# Altium footprint library CHIP-Library.PcbLib: 345 footprints (part 20 of 22)
Each footprint in its own frame and in the unit in brackets; x right, y up, seen from the top. Pads: shape width x height; smd on the part's side, far side on the other; paste and mask are expansions set on the pad; w line width, h text height; cw(c..) or ccw(c..) is an arc to the next point about the centre after c.
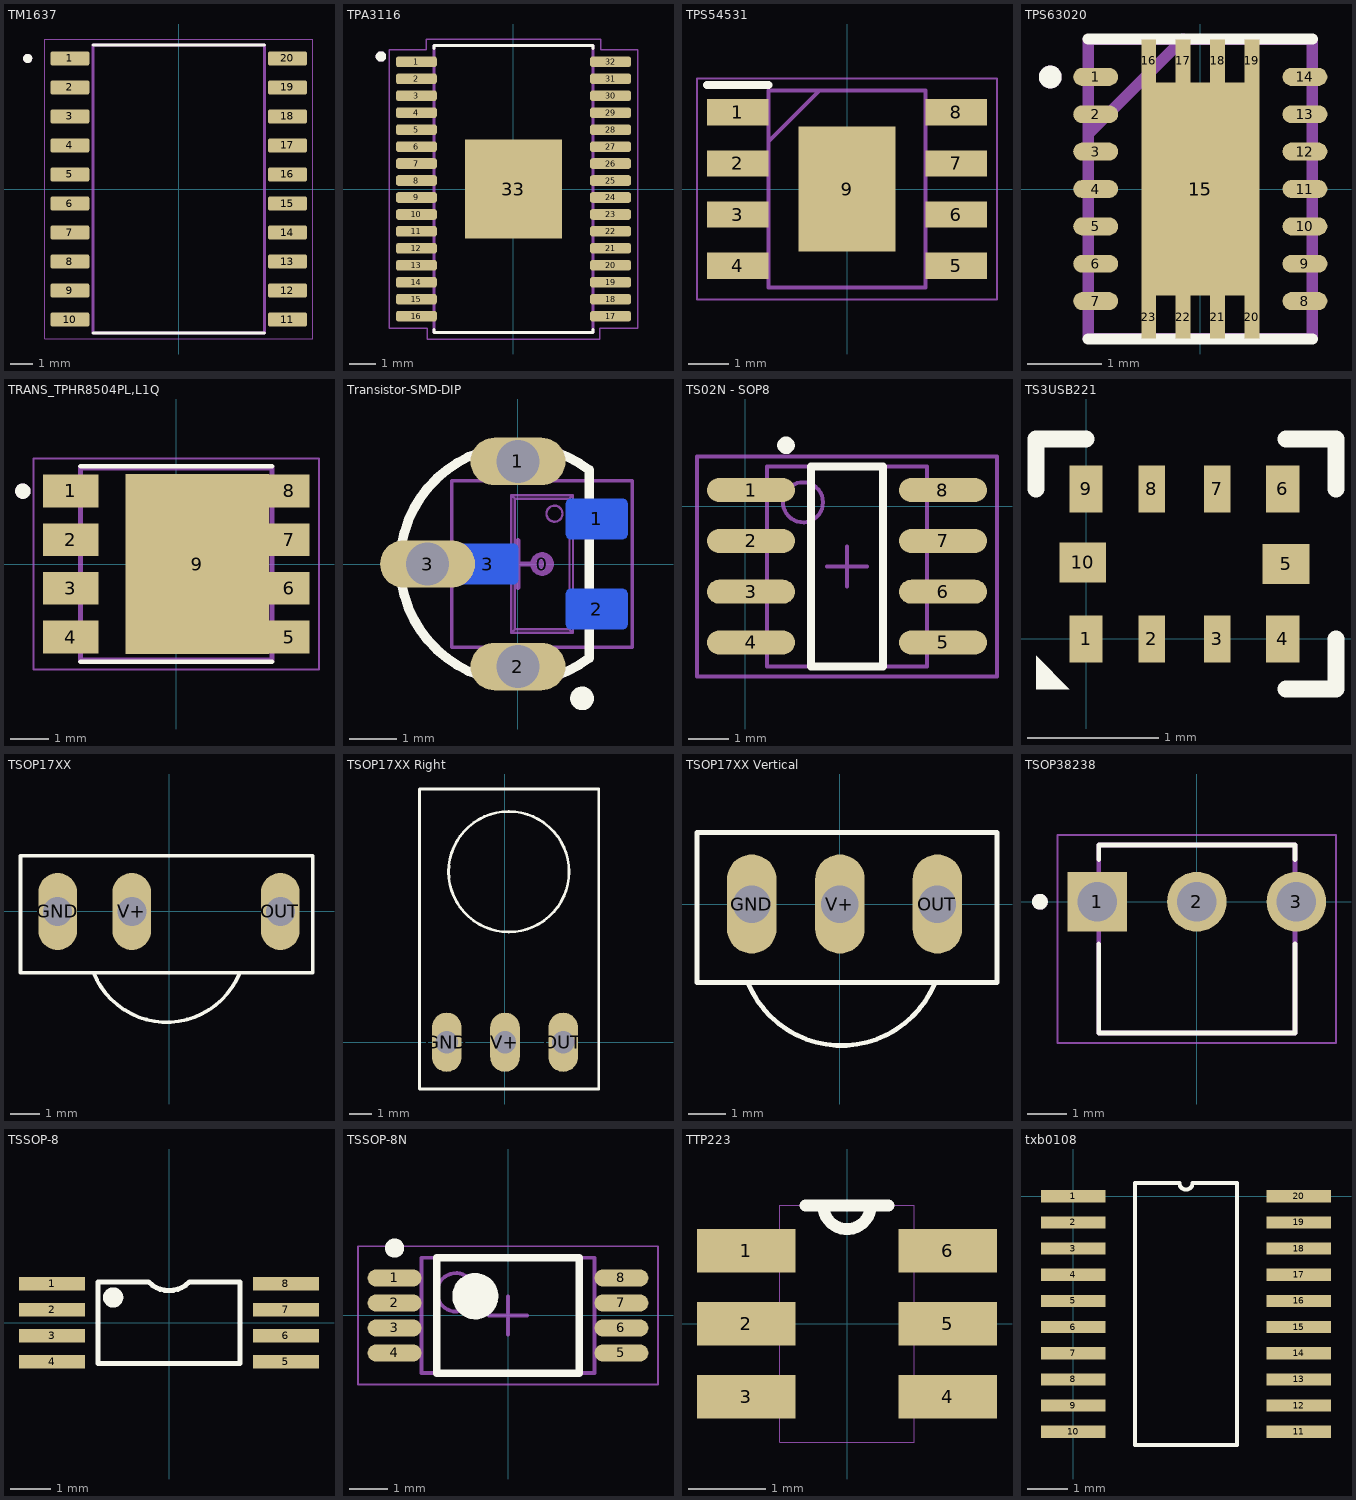
[diagram p19: the footprints below, top view; thin cyan lines are the x and y axes]

## TM1637 [mm] "SOP20"
height 2.55
pads (20):
  rrect25% 1.7x0.61 smd: 1(-4.76,5.715) 2(-4.76,4.445) 3(-4.76,3.175) 4(-4.76,1.905) 5(-4.76,0.635) 6(-4.76,-0.635) 7(-4.76,-1.905) 8(-4.76,-3.175) 9(-4.76,-4.445) 10(-4.76,-5.715) 11(4.76,-5.715) 12(4.76,-4.445) 13(4.76,-3.175) 14(4.76,-1.905) 15(4.76,-0.635) 16(4.76,0.635) 17(4.76,1.905) 18(4.76,3.175) 19(4.76,4.445) 20(4.76,5.715)
Top Overlay:
  circle w0.2: c-6.61,5.715 r0.1
  lines w0.127: -3.75,-6.3 3.75,-6.3 ; -3.75,6.3 3.75,6.3
Mechanical 13:
  circle w0.2: c-6.61,5.715 r0.1
  lines w0.127: -3.75,-6.3 3.75,-6.3 3.75,6.3 -3.75,6.3 -3.75,-6.3
Mechanical 15:
  lines w0.05: -5.86,-6.55 -5.86,6.55 5.86,6.55 5.86,-6.55 -5.86,-6.55
3D body "step_temp.STEP": height 2.55, standoff 0, extent -5.175,-6.3 5.175,6.3

## TPA3116 [mm]
pads (33):
  rrect50% 1.57x0.41 smd: 1(-3.72,4.875) 2(-3.72,4.225) 3(-3.72,3.575) 4(-3.72,2.925) 5(-3.72,2.275) 6(-3.72,1.625) 7(-3.72,0.975) 8(-3.72,0.325) 9(-3.72,-0.325) 10(-3.72,-0.975) 11(-3.72,-1.625) 12(-3.72,-2.275) 13(-3.72,-2.925) 14(-3.72,-3.575) 15(-3.72,-4.225) 16(-3.72,-4.875) 17(3.72,-4.875) 18(3.72,-4.225) 19(3.72,-3.575) 20(3.72,-2.925) 21(3.72,-2.275) 22(3.72,-1.625) 23(3.72,-0.975) 24(3.72,-0.325) 25(3.72,0.325) 26(3.72,0.975) 27(3.72,1.625) 28(3.72,2.275) 29(3.72,2.925) 30(3.72,3.575) 31(3.72,4.225) 32(3.72,4.875)
  rect 3.71x3.81 smd paste-3: 33(0,0)
Top Overlay:
  circle w0.2: c-5.08,5.08 r0.1
  lines w0.127: -3.05,-5.4 -3.05,-5.5 3.05,-5.5 3.05,-5.4 ; -3.05,5.4 -3.05,5.5 3.05,5.5 3.05,5.4
Top Paste:
  region: 1.485,-1.535 0.185,-1.535 0.185,-0.185 1.485,-0.185
  region: -0.185,-1.535 -1.485,-1.535 -1.485,-0.185 -0.185,-0.185
  region: -0.185,0.185 -1.485,0.185 -1.485,1.535 -0.185,1.535
  region: 1.485,0.185 0.185,0.185 0.185,1.535 1.485,1.535
Mechanical 13:
  circle w0.2: c-5.08,5.08 r0.1
  lines w0: -3.099,-5.029 -3.099,-4.724 ; -3.099,-4.369 -3.099,-4.064 ; -3.099,-3.734 -3.099,-3.429 ; -3.099,-3.073 -3.099,-2.769 ; -3.099,-2.413 -3.099,-2.134 ; -3.099,-1.778 -3.099,-1.473 ; -3.099,-1.118 -3.099,-0.813 ; -3.099,-0.483 -3.099,-0.178 ; -3.099,0.178 -3.099,0.483 ; -3.099,0.813 -3.099,1.118 ; -3.099,1.473 -3.099,1.778 ; -3.099,2.134 -3.099,2.413 ; -3.099,2.769 -3.099,3.073 ; -3.099,3.429 -3.099,3.734 ; -3.099,4.064 -3.099,4.369 ; -3.099,4.724 -3.099,5.029 ; 3.099,-5.029 3.099,-4.724 ; 3.099,-4.369 3.099,-4.064 ; 3.099,-3.734 3.099,-3.429 ; 3.099,-3.073 3.099,-2.769 ; 3.099,-2.413 3.099,-2.134 ; 3.099,-1.778 3.099,-1.473 ; 3.099,-1.118 3.099,-0.813 ; 3.099,-0.483 3.099,-0.178 ; 3.099,0.178 3.099,0.483 ; 3.099,0.813 3.099,1.118 ; 3.099,1.473 3.099,1.778 ; 3.099,2.134 3.099,2.413 ; 3.099,2.769 3.099,3.073 ; 3.099,3.429 3.099,3.734 ; 3.099,4.064 3.099,4.369 ; 3.099,4.724 3.099,5.029
  lines w0.127: -3.05,-5.5 -3.05,5.5 3.05,5.5 3.05,-5.5 -3.05,-5.5
Mechanical 15:
  lines w0.05: -4.76,-5.33 -4.76,5.33 -3.35,5.33 -3.35,5.75 3.35,5.75 3.35,5.33 4.76,5.33 4.76,-5.33 3.3,-5.33 3.3,-5.75 -3.3,-5.75 -3.3,-5.33 -4.76,-5.33
3D body "TPA3116D2QDADRQ1.STEP": height 1.2, standoff 0, extent -4.05,-5.5 4.05,5.5

## TPS54531 [mm]
pads (9):
  rect 1.525x0.65 smd: 1(-2.712,1.905) 2(-2.712,0.635) 3(-2.712,-0.635) 4(-2.712,-1.905) 5(2.712,-1.905) 6(2.712,-0.635) 7(2.712,0.635) 8(2.712,1.905)
  rect 2.4x3.1 smd: 9(0,0)
Top Overlay:
  lines w0.2: -3.475,2.58 -1.95,2.58
Mechanical 15:
  lines w0.1: -1.95,1.18 -0.68,2.45 ; -1.95,-2.45 1.95,-2.45 1.95,2.45 -1.95,2.45 -1.95,-2.45
Mechanical 20:
  lines w0.05: -3.725,-2.75 3.725,-2.75 3.725,2.75 -3.725,2.75 -3.725,-2.75
3D body "TPS54531DDAR.stp": height 1.57, standoff 0, extent -3,-2.45 3,2.45

## TPS63020 [mm]
pads (23):
  oval 0.6x0.24 smd: 1(-1.4,1.5) 2(-1.4,1) 3(-1.4,0.5) 4(-1.4,0) 5(-1.4,-0.5) 6(-1.4,-1) 7(-1.4,-1.5) 8(1.4,-1.5) 9(1.4,-1) 10(1.4,-0.5) 11(1.4,0) 12(1.4,0.5) 13(1.4,1) 14(1.4,1.5)
  rect 1.58x2.85 smd: 15(0,0)
  rect 0.2x0.575 smd: 16(-0.69,1.713) 17(-0.23,1.713) 18(0.23,1.713) 19(0.69,1.713) 20(0.69,-1.713) 21(0.23,-1.713) 22(-0.23,-1.713) 23(-0.69,-1.713)
Top Overlay:
  lines w0.152: -1.499,-2.007 1.499,-2.007 ; -1.499,2.007 1.499,2.007 ; -2.083,1.499 ccw(c-2.007,1.499) -1.93,1.499 ccw(c-2.007,1.499) -2.083,1.499
Top Paste:
  region: 0.12,-0.12 0.78,-0.12 0.78,-1.372 0.12,-1.372
  region: 0.12,1.37 0.78,1.37 0.78,0.12 0.12,0.12
  region: -0.781,1.37 -0.12,1.37 -0.12,0.12 -0.781,0.12
  region: -0.78,-0.12 -0.12,-0.12 -0.12,-1.37 -0.78,-1.37
Mechanical 4:
  lines w0.152: -2.083,1.499 ccw(c-2.007,1.499) -1.93,1.499 ; -2.083,1.499 cw(c-2.007,1.499) -1.93,1.499 ; -2.083,1.499 ccw(c-2.007,1.499) -1.93,1.499 ; -2.083,1.499 cw(c-2.007,1.499) -1.93,1.499 ; -1.5,-2 1.5,-2 ; -1.5,-2 -1.5,2 ; -1.5,-2 1.5,-2 ; -1.5,-2 -1.5,2 ; -1.5,2 1.5,2 ; -1.5,2 1.5,2 ; 1.5,-2 1.5,2 ; 1.5,-2 1.5,2 ; -1.499,0.737 -0.229,2.007 -1.499,0.737
3D body "User Library-VSON-14-1.step": height 1.06, standoff 0.01, extent -1.588,-2.084 1.622,2.126

## TRANS_TPHR8504PL,L1Q [mm]
pads (9):
  rect 1.45x0.85 smd: 1(-2.75,1.905) 2(-2.75,0.635) 3(-2.75,-0.635) 4(-2.75,-1.905)
  rect 1.05x0.85 smd: 5(2.95,-1.905) 6(2.95,-0.635) 7(2.95,0.635) 8(2.95,1.905)
  rect 3.75x4.7 smd paste-3: 9(0.55,0)
Top Overlay:
  circle w0.2: c-4,1.9 r0.1
  lines w0.127: -2.5,-2.55 2.5,-2.55 ; -2.5,2.55 2.5,2.55
Top Paste:
  region: 2.04,-1.186 -0.94,-1.186 -0.94,1.186 2.04,1.186
Mechanical 13:
  circle w0.2: c-4,1.9 r0.1
  lines w0.127: -2.5,-2.5 2.5,-2.5 2.5,2.5 -2.5,2.5 -2.5,-2.5
Mechanical 15:
  lines w0.05: -3.725,-2.75 3.725,-2.75 3.725,2.75 -3.725,2.75 -3.725,-2.75
3D body "TPHR8504PL,L1Q.STEP": height 1.01, standoff 0.01, extent -2.921,-2.633 3.079,2.667

## Transistor-SMD-DIP [mm]
pads (7):
  round 0.5 on Mech15: 0(0.508,0)
  oval 2x1 hole 0.9: 1(0,2.159) 2(0,-2.159) 3(-1.905,0)
  rrect25% 1.3x0.85 smd far side: 1(1.658,0.95) 2(1.658,-0.95) 3(-0.642,0)
Top Overlay:
  circle w0.25: c1.35,-2.83 r0.125
  lines w0.2: 1.5,-1.98 cw(c0,0) 1.5,1.98 1.5,-1.98
Bottom Overlay:
  lines w0.127: 0.127,-1.45 0.127,1.45 0.889,1.45 0.889,-1.45 0.127,-1.45
  text "." at 2.633,0.95 h1.4
Mechanical 13:
  circle w0.05: c0.768,1.06 r0.169
  lines w0.05: -0.682,-0.24 -0.682,0.24 ; -0.591,-0.24 -0.591,0.24 ; -0.566,-0.24 -0.566,0.24 ; -0.317,-0.24 -0.317,0.24 ; -0.142,-0.24 -0.892,-0.24 -0.892,0.24 -0.142,0.24 ; 1.158,-1.19 1.908,-1.19 1.908,-0.71 1.158,-0.71 ; 1.158,0.71 1.908,0.71 1.908,1.19 1.158,1.19 ; 1.333,-1.19 1.333,-0.71 ; 1.333,0.71 1.333,1.19 ; 1.582,-1.19 1.582,-0.71 ; 1.582,0.71 1.582,1.19 ; 1.607,-1.19 1.607,-0.71 ; 1.607,0.71 1.607,1.19 ; 1.698,-1.19 1.698,-0.71 ; 1.698,0.71 1.698,1.19 ; -0.142,-1.45 -0.142,1.45 ; -0.142,-1.45 -0.068,-1.376 ; -0.142,-1.45 1.158,-1.45 ; -0.142,1.45 1.158,1.45 ; -0.142,1.45 -0.068,1.376 ; -0.068,-1.376 -0.068,1.376 ; -0.068,-1.376 1.084,-1.376 ; -0.068,1.376 1.084,1.376 ; 1.084,-1.376 1.084,1.376 ; 1.084,-1.376 1.158,-1.45 ; 1.084,1.376 1.158,1.45 ; 1.158,-1.45 1.158,1.45
  lines w0.1: 1.5,-1.98 cw(c0,0) 1.5,1.98 1.5,-1.98
Mechanical 15:
  lines w0.076: -1.392,-1.75 -1.392,1.75 2.408,1.75 2.408,-1.75 -1.392,-1.75
  lines w0.1: -0.5,0 0.5,0 ; 0,-0.5 0,0.5
3D body "SOT23-3.STEP": height 1.29, standoff -0.01, extent -0.892,-1.45 1.908,1.45
3D body: height 6.86, standoff 2.2, extent -2.485,-2.495 1.501,2.495

## TS02N - SOP8 [mm] "Designed by Hadi Aghabeigi - PANIC Electronic"
height 4
pads (8):
  oval 2.2x0.6 smd: 1(0.14,0.41) 2(0.14,-0.86) 3(0.14,-2.13) 4(0.14,-3.4) 5(4.94,-3.4) 6(4.94,-2.13) 7(4.94,-0.86) 8(4.94,0.41)
Top Overlay:
  circle w0.25: c1.015,1.53 r0.094
  lines w0.2: 1.64,-3.995 1.64,1.005 3.44,1.005 3.44,-3.995 1.64,-3.995
Mechanical 13:
  circle w0.1: c1.44,0.105 r0.5
  lines w0.1: 0.54,-3.995 0.54,1.005 4.54,1.005 4.54,-3.995 0.54,-3.995
Mechanical 15:
  lines w0.1: 2.04,-1.495 3.04,-1.495 ; 2.54,-1.995 2.54,-0.995 ; -1.21,-4.245 -1.21,1.255 6.29,1.255 6.29,-4.245 -1.21,-4.245
3D body: height 1.75, standoff 0, extent 0.54,-3.995 4.54,1.005

## TS3USB221 [mil] "USB multiplex"
pads (10):
  rect 10x14 smd: 1(0,0) 4(59.05,0) 6(59.05,45) 9(0,45)
  rect 8x14 smd: 2(19.68,0) 3(39.37,0) 7(39.37,45) 8(19.68,45)
  rect 14x12 smd: 5(60,22.5) 10(-1,23)
Top Overlay:
  region: -15,-5 -5,-15 -15,-15
  lines w5: -15,45 -15,60 0,60 ; 60,-15 75,-15 75,0 ; 60,60 75,60 75,45

## TSOP17XX [mil] "IR Receiver Dip"
pads (3):
  oval 52x104 hole 39.37: GND(-150,0) OUT(150,0) V+(-50,0)
Top Overlay:
  lines w5: -101.44,-82.82 ccw(c-3.15,-43.11) 95.14,-82.82 ; -200,-82.48 -200,75 -101.57,75 95.28,75 193.7,75 193.7,-82.48 95.28,-82.48 -101.57,-82.48 -200,-82.48
3D body "step_temp.STEP": height 1224.41, standoff 0, extent -196.85,-165.35 196.85,62.99

## TSOP17XX Right [mil] "IR Receiver Dip"
pads (3):
  oval 52x104 hole 39.37: GND(-102.36,0) OUT(102.36,0) V+(0,0)
Top Overlay:
  circle w5: c6.71,299.71 r106.01
  lines w5: -150,-82.28 -150,445.2 165,445.2 165,-82.28 145.28,-82.28 -51.57,-82.28 -150,-82.28
3D body "User Library-User Library-TSSP40_IR reciver.step": height 205.36, standoff -96.46, extent -116.22,-8.33 120,438.33

## TSOP17XX Vertical [mil] "IR Receiver Dip"
pads (3):
  oval 52x104 hole 39.37: GND(-92.52,0) OUT(102.36,0) V+(0,0)
Top Overlay:
  lines w5: -96.58,-82.28 ccw(c1.71,-42.57) 100,-82.28 ; -150,-82.28 -150,75.2 -51.57,75.2 145.28,75.2 165,75.2 165,-82.28 145.28,-82.28 -51.57,-82.28 -150,-82.28
3D body "User Library-IR Receiver.step": height 334.65, standoff -90.55, extent -117.05,-171.22 127.05,65

## TSOP38238 [mm]
pads (3):
  rect 1.518x1.518 hole 1.01: 1(-2.54,0)
  round 1.518 hole 1.01: 2(0,0) 3(2.54,0)
Top Overlay:
  circle w0.2: c-4,0 r0.1
  lines w0.127: -2.5,-1.08 -2.5,-3.35 2.5,-3.35 2.5,-1.08 ; -2.5,1.08 -2.5,1.45 2.5,1.45 2.5,1.08
Mechanical 13:
  circle w0.2: c-4,0 r0.1
  lines w0.127: -2.5,-3.35 -2.5,1.45 2.5,1.45 2.5,-3.35 -2.5,-3.35
Mechanical 15:
  lines w0.05: -3.55,-3.6 -3.55,1.7 3.55,1.7 3.55,-3.6 -3.55,-3.6
3D body "User Library-TSOP18x.step": height 10.95, standoff -4, extent -2.89,-3.4 2.89,1.4

## TSSOP-8 [mil]
pads (8):
  rect 65x13.5 smd: 1(-115.2,38.4) 2(-115.2,12.8) 3(-115.2,-12.8) 4(-115.2,-38.4) 5(115.2,-38.4) 6(115.2,-12.8) 7(115.2,12.8) 8(115.2,38.4)
Top Overlay:
  circle w10: c-55,25 r5
  lines w5: -70,-40 70,-40 70,40 20,40 cw(c0,60) -20,40 -70,40 -70,-40
3D body "User Library-TSSOP-8.STEP": height 47.24, standoff 0, extent -125.99,-59.06 125.98,59.05

## TSSOP-8N [mm]
height 1.2
pads (8):
  oval 1.4x0.45 smd: 1(-2.95,0.975) 2(-2.95,0.325) 3(-2.95,-0.325) 4(-2.95,-0.975) 5(2.95,-0.975) 6(2.95,-0.325) 7(2.95,0.325) 8(2.95,0.975)
Top Overlay:
  circle w0.25: c-2.95,1.75 r0.125
  circle w0.6: c-0.85,0.5 r0.3
  lines w0.2: -1.85,-1.5 -1.85,1.5 1.85,1.5 1.85,-1.5 -1.85,-1.5
Mechanical 13:
  circle w0.1: c-1.35,0.6 r0.5
  lines w0.1: -2.25,-1.5 -2.25,1.5 2.25,1.5 2.25,-1.5 -2.25,-1.5
Mechanical 15:
  lines w0.05: -3.9,-1.8 -3.9,1.8 3.9,1.8 3.9,-1.8 -3.9,-1.8
  lines w0.1: -0.5,0 0.5,0 ; 0,-0.5 0,0.5
3D body: height 1.2, standoff 0.05, extent -2.25,-1.5 2.25,1.5

## TTP223 [mil]
pads (6):
  rect 50x22 smd: 1(-51,37) 2(-51,0) 3(-51,-37) 4(51,-37) 5(51,0) 6(51,37)
Top Overlay:
  lines w6: -21,60 -12,60 ; 21,60 12,60 ; -12,60 ccw(c0,60) 12,60 ; -12,60 12,60
Mechanical 4:
  lines w0: -59,-47 -59,-28 ; -59,-47 -34,-47 ; -59,-47 -59,-28 ; -59,-47 -34,-47 ; -59,-28 -34,-28 ; -59,-28 -34,-28 ; -59,-10 -59,10 ; -59,-10 -34,-10 ; -59,-10 -59,10 ; -59,-10 -34,-10 ; -59,10 -34,10 ; -59,10 -34,10 ; -59,28 -59,47 ; -59,28 -34,28 ; -59,28 -59,47 ; -59,28 -34,28 ; -59,47 -34,47 ; -59,47 -34,47 ; -34,-60 34,-60 ; -34,-60 -34,-47 ; -34,-60 34,-60 ; -34,-60 -34,-47 ; -34,-47 -34,-28 ; -34,-47 -34,-28 ; -34,-28 -34,-10 ; -34,-28 -34,-10 ; -34,-10 -34,10 ; -34,-10 -34,10 ; -34,10 -34,28 ; -34,10 -34,28 ; -34,28 -34,47 ; -34,28 -34,47 ; -34,47 -34,60 ; -34,47 -34,60 ; -34,60 -12,60 ; -34,60 -12,60 ; -12,60 ccw(c0,60) 12,60 ; -12,60 ccw(c0,60) 12,60 ; -12,60 12,60 ; -12,60 12,60 ; 12,60 34,60 ; 12,60 34,60 ; 34,-60 34,-47 ; 34,-60 34,-47 ; 34,-47 34,-28 ; 34,-47 59,-47 ; 34,-47 34,-28 ; 34,-47 59,-47 ; 34,-28 34,-10 ; 34,-28 59,-28 ; 34,-28 34,-10 ; 34,-28 59,-28 ; 34,-10 34,10 ; 34,-10 59,-10 ; 34,-10 34,10 ; 34,-10 59,-10 ; 34,10 34,28 ; 34,10 59,10 ; 34,10 34,28 ; 34,10 59,10 ; 34,28 34,47 ; 34,28 59,28 ; 34,28 34,47 ; 34,28 59,28 ; 34,47 34,60 ; 34,47 59,47 ; 34,47 34,60 ; 34,47 59,47 ; 59,-47 59,-28 ; 59,-47 59,-28 ; 59,-10 59,10 ; 59,-10 59,10 ; 59,28 59,47 ; 59,28 59,47
3D body "User Library-SOT23-6-2.STEP": height 57.09, standoff 0, extent -55.11,-57.09 55.13,57.08

## txb0108 [mm]
pads (20):
  rect 1.6x0.3 smd: 1(0,0) 2(0,-0.65) 3(0,-1.3) 4(0,-1.95) 5(0,-2.6) 6(0,-3.25) 7(0,-3.9) 8(0,-4.55) 9(0,-5.2) 10(0,-5.85) 11(5.6,-5.85) 12(5.6,-5.2) 13(5.6,-4.55) 14(5.6,-3.9) 15(5.6,-3.25) 16(5.6,-2.6) 17(5.6,-1.95) 18(5.6,-1.3) 19(5.6,-0.65) 20(5.6,0)
Top Overlay:
  lines w0.1: 1.535,-6.175 1.535,0.325 2.638,0.325 ccw(c2.8,0.325) 2.962,0.325 4.065,0.325 4.065,-6.175 1.535,-6.175
3D body "TXB0108PWR--3DModel-STEP-56544 (2).STEP": height 1.18, standoff -0.02, extent -0.406,-6.171 5.994,0.329